# Altium footprint library capstone.PcbLib: 11 footprints
Each footprint in its own frame and in the unit in brackets; x right, y up, seen from the top. Pads: shape width x height; smd on the part's side, far side on the other; paste and mask are expansions set on the pad; w line width, h text height; cw(c..) or ccw(c..) is an arc to the next point about the centre after c.
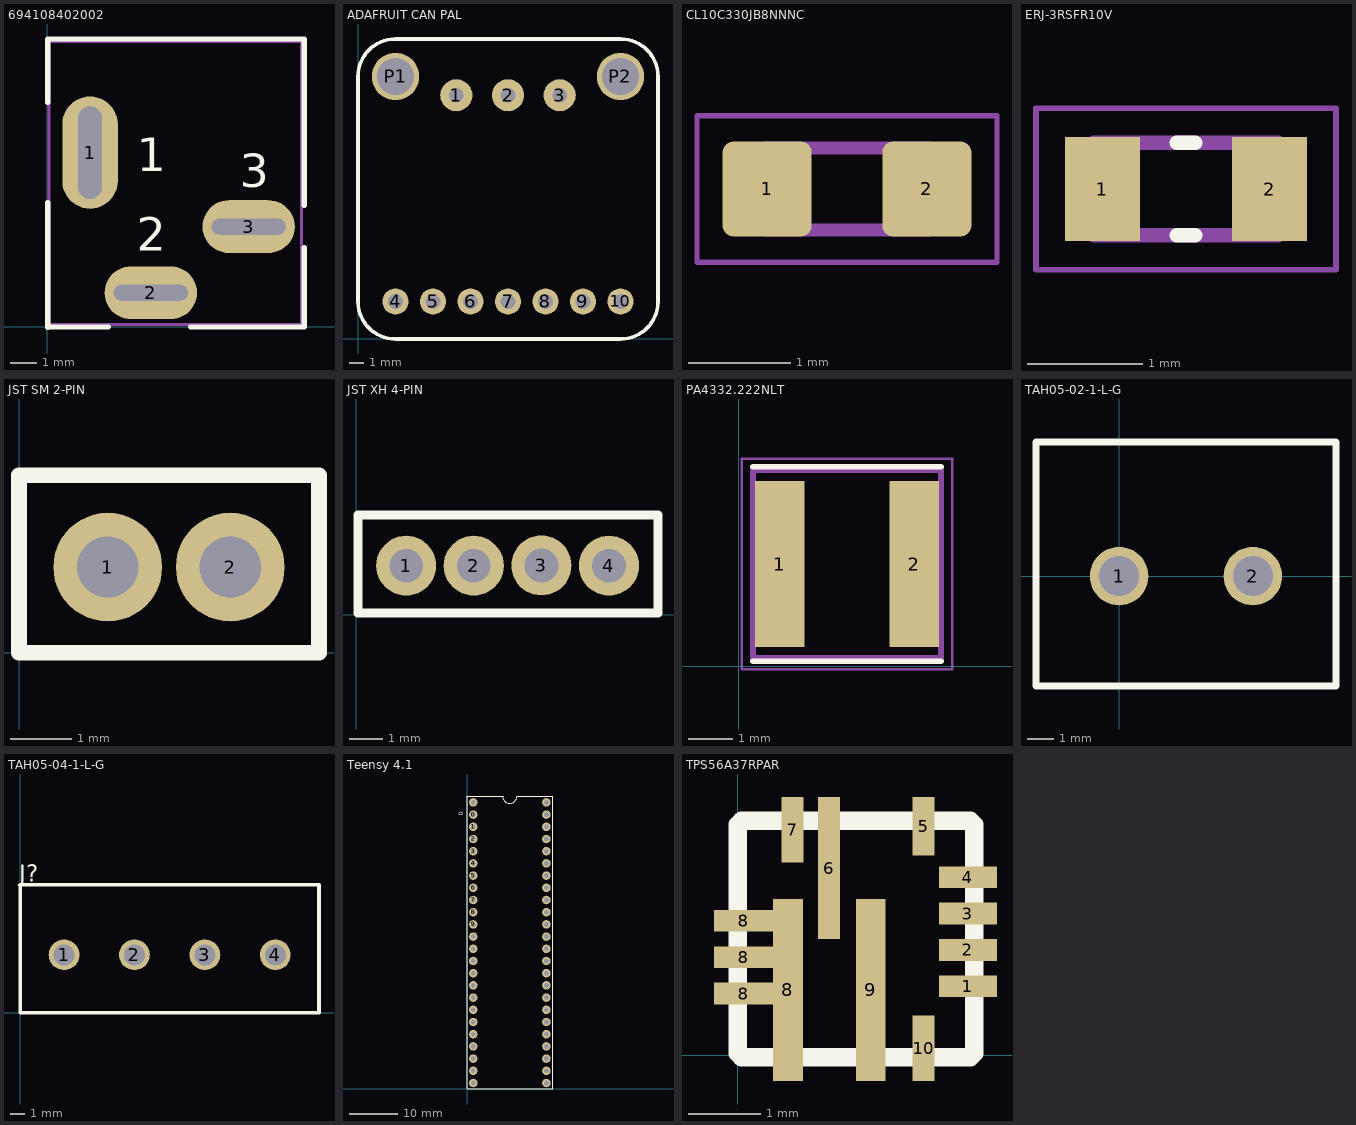
[diagram p0: the footprints below, top view; thin cyan lines are the x and y axes]

## 694108402002 [mm]
pads (3):
  oval 2.1x4.25 hole 0.9 slot 3.5 at 90 deg mask+0.102: 1(1.627,6.583)
  oval 3.5x2 hole 0.6 slot 2.8 at 0 deg mask+0.102: 2(3.927,1.283) 3(7.627,3.783)
Top Overlay:
  lines w0.2: 0.025,-0.025 2.327,-0.017 ; 0.025,-0.017 0.025,4.683 ; 0.025,8.483 0.025,10.883 9.727,10.883 9.727,4.583 ; 5.427,-0.017 9.727,-0.017 9.727,2.983
  text "2" at 3.4,2.875 h1.27
  text "3" at 7.3,5.275 h1.27
  text "1" at 3.4,5.875 h1.27
Mechanical 13:
  lines w0.1: 0.827,6.383 1.127,6.683 ; 0.927,6.683 1.127,6.683 ; 1.127,6.483 1.127,6.683 ; 0.075,0.083 0.075,10.783 9.627,10.783 9.627,0.083 0.075,0.083
3D body "step_temp.STEP": height 14, standoff -3.6, extent 0.6,0.225 9.6,10.925

## ADAFRUIT CAN PAL [mil]
pads (12):
  round 86 hole 39.37: 1(262.2,650) 2(400,650) 3(537.8,650)
  round 70 hole 39.37: 4(100,100) 5(200,100) 6(300,100) 7(400,100) 8(500,100) 9(600,100) 10(700,100)
  round 125.98 hole 98.43: P1(100,700) P2(700,700)
Top Overlay:
  lines w10: 0,100 ccw(c100,100) 100,0 700,0 ccw(c700,100) 800,100 800,700 ccw(c700,700) 700,800 100,800 ccw(c100,700) 0,700 0,100
3D body "ADAFRUIT CAN Pal.step": height 396.46, standoff -79.92, extent 0,0 800,800

## CL10C330JB8NNNC [mm]
pads (2):
  rrect25% 0.87x0.93 smd: 1(0.871,1.651) 2(2.431,1.651)
Mechanical 13:
  lines w0.127: 0.851,1.251 2.451,1.251 2.451,2.051 0.851,2.051 0.851,1.251
Mechanical 15:
  lines w0.05: 0.186,0.936 3.116,0.936 3.116,2.366 0.186,2.366 0.186,0.936
3D body "step_temp.STEP": height 0.9, standoff 0, extent 0.851,1.251 2.451,2.051

## ERJ-3RSFR10V [mm]
pads (2):
  rect 0.65x0.9 smd: 1(0.926,1.524) 2(2.376,1.524)
Top Overlay:
  lines w0.127: 1.571,1.124 1.731,1.124 ; 1.571,1.924 1.731,1.924
Mechanical 13:
  lines w0.127: 0.851,1.124 0.851,1.924 2.451,1.924 2.451,1.124 0.851,1.124
Mechanical 15:
  lines w0.05: 0.351,0.824 0.351,2.224 2.951,2.224 2.951,0.824 0.351,0.824
3D body "step_temp.STEP": height 0.45, standoff 0, extent 0.851,1.124 2.451,1.924

## JST SM 2-PIN [mm]
pads (2):
  round 1.778 hole 1: 1(1.45,1.4) 2(3.45,1.4)
Top Overlay:
  lines w0.254: 0,0 0,2.9 4.9,2.9 4.9,0 0,0

## JST XH 4-PIN [mm]
pads (4):
  round 1.778 hole 1: 1(1.475,1.45) 2(3.475,1.45) 3(5.475,1.457) 4(7.475,1.45)
Top Overlay:
  lines w0.254: 0.05,0.05 8.925,0.05 8.925,2.95 0.05,2.95 0.05,0.05

## PA4332.222NLT [mm]
pads (2):
  rect 1.1x3.7 smd: 1(0.913,2.286) 2(3.913,2.286)
Top Overlay:
  lines w0.127: 0.313,0.116 4.513,0.116 ; 0.313,4.456 4.513,4.456
Mechanical 13:
  lines w0.127: 0.313,0.186 0.313,4.386 4.513,4.386 4.513,0.186 0.313,0.186
Mechanical 15:
  lines w0.05: 0.063,-0.064 0.063,4.636 4.763,4.636 4.763,-0.064 0.063,-0.064
3D body "step_temp.STEP": height 2, standoff 0, extent 0.313,0.186 4.513,4.386

## TAH05-02-1-L-G [mil]
pads (2):
  round 86 hole 59.06: 1(0,0) 2(196.85,0)
Top Overlay:
  lines w10: -122.05,-161.42 318.9,-161.42 318.9,196.85 -122.05,196.85 -122.05,-161.42
3D body "TAH05-02-1-L-G.stp": height 515.75, standoff -196.85, extent -122.05,-161.42 318.9,196.85

## TAH05-04-1-L-G [mm]
pads (4):
  round 2.184 hole 1.5: 1(3.1,4.1) 2(8.1,4.1) 3(13.1,4.1) 4(18.1,4.1)
Top Overlay:
  lines w0.254: 0,0 0,9.075 21.2,9.075 21.2,-0.025 0.025,-0.025
  text "J?" at -0.1,9.275 h1.2

## Teensy 4.1 [mil]
pads (48):
  round 70 hole 39.37: 0(50,2249.21) 1(50,2149.21) 2(50,2049.21) 3(50,1949.21) 3V1(650,2149.21) 3V2(50,949.21) 4(50,1849.21) 5(50,1749.21) 5V(650,2349.21) 6(50,1649.21) 7(50,1549.21) 8(50,1449.21) 9(50,1349.21) 10(50,1249.21) 11(50,1149.21) 12(50,1049.21) 13(650,1049.21) 14(650,1149.21) 15(650,1249.21) 16(650,1349.21) 17(650,1449.21) 18(650,1549.21) 19(650,1649.21) 20(650,1749.21) 21(650,1849.21) 22(650,1949.21) 23(650,2049.21) 24(50,849.61) 25(50,749.21) 26(50,649.21) 27(50,549.21) 28(50,449.21) 29(50,349.21) 30(50,249.21) 31(50,149.21) 32(50,49.21) 33(650,49.21) 34(650,149.21) 35(650,249.21) 36(650,349.21) 37(650,449.21) 38(650,549.21) 39(650,649.21) 40(650,749.21) 41(650,849.61) G1(50,2349.21) G2(650,2249.21) G3(650,949.21)
Top Overlay:
  lines w10: 0,2398.62 0,0 700,0 700,2400 ; 0,2400 290.35,2400 ; 290.94,2400 ccw(c350,2400) 409.06,2400 ; 409.45,2400 699.8,2400
  text "0" at -30,2238.35 h39.37
3D body "Teensy 4.1 (Without Headers).step": height 148.37, standoff -33.46, extent -1.55,-1.24 698.45,2447.97

## TPS56A37RPAR [mm]
pads (13):
  rect 0.8x0.3 smd: 1(3.165,0.95) 2(3.165,1.45) 3(3.165,1.95) 4(3.165,2.45)
  rect 0.3x0.8 smd: 5(2.555,3.15)
  rect 0.3x1.95 smd: 6(1.255,2.575)
  rect 0.3x0.9 smd: 7(0.755,3.1) 10(2.555,0.1)
  rect 0.815x0.3 smd: 8(0.08,0.85) 8(0.08,1.35) 8(0.08,1.85)
  rect 0.41x2.5 smd: 8(0.69,0.9) 9(1.83,0.9)
Top Overlay:
  lines w0.254: -0.002,0.027 -0.002,3.173 ; 0.052,-0.027 3.198,-0.027 ; 0.052,3.227 3.198,3.227 ; 3.252,0.027 3.252,3.173
Bottom Overlay:
  lines w0.254: -0.002,0.027 0.052,-0.027 ; -0.002,3.173 0.052,3.227 ; 3.198,-0.027 3.252,0.027 ; 3.198,3.227 3.252,3.173
3D body "TPS56A37RPAR--3DModel-STEP-56544.STEP": height 1, standoff 0, extent 0.125,0.1 3.125,3.1